# Altium footprint library MY_LIB_Connectors_CONNFLY.PcbLib: 239 footprints (part 15 of 15)
Each footprint in its own frame and in the unit in brackets; x right, y up, seen from the top. Pads: shape width x height; smd on the part's side, far side on the other; paste and mask are expansions set on the pad; w line width, h text height; cw(c..) or ccw(c..) is an arc to the next point about the centre after c.
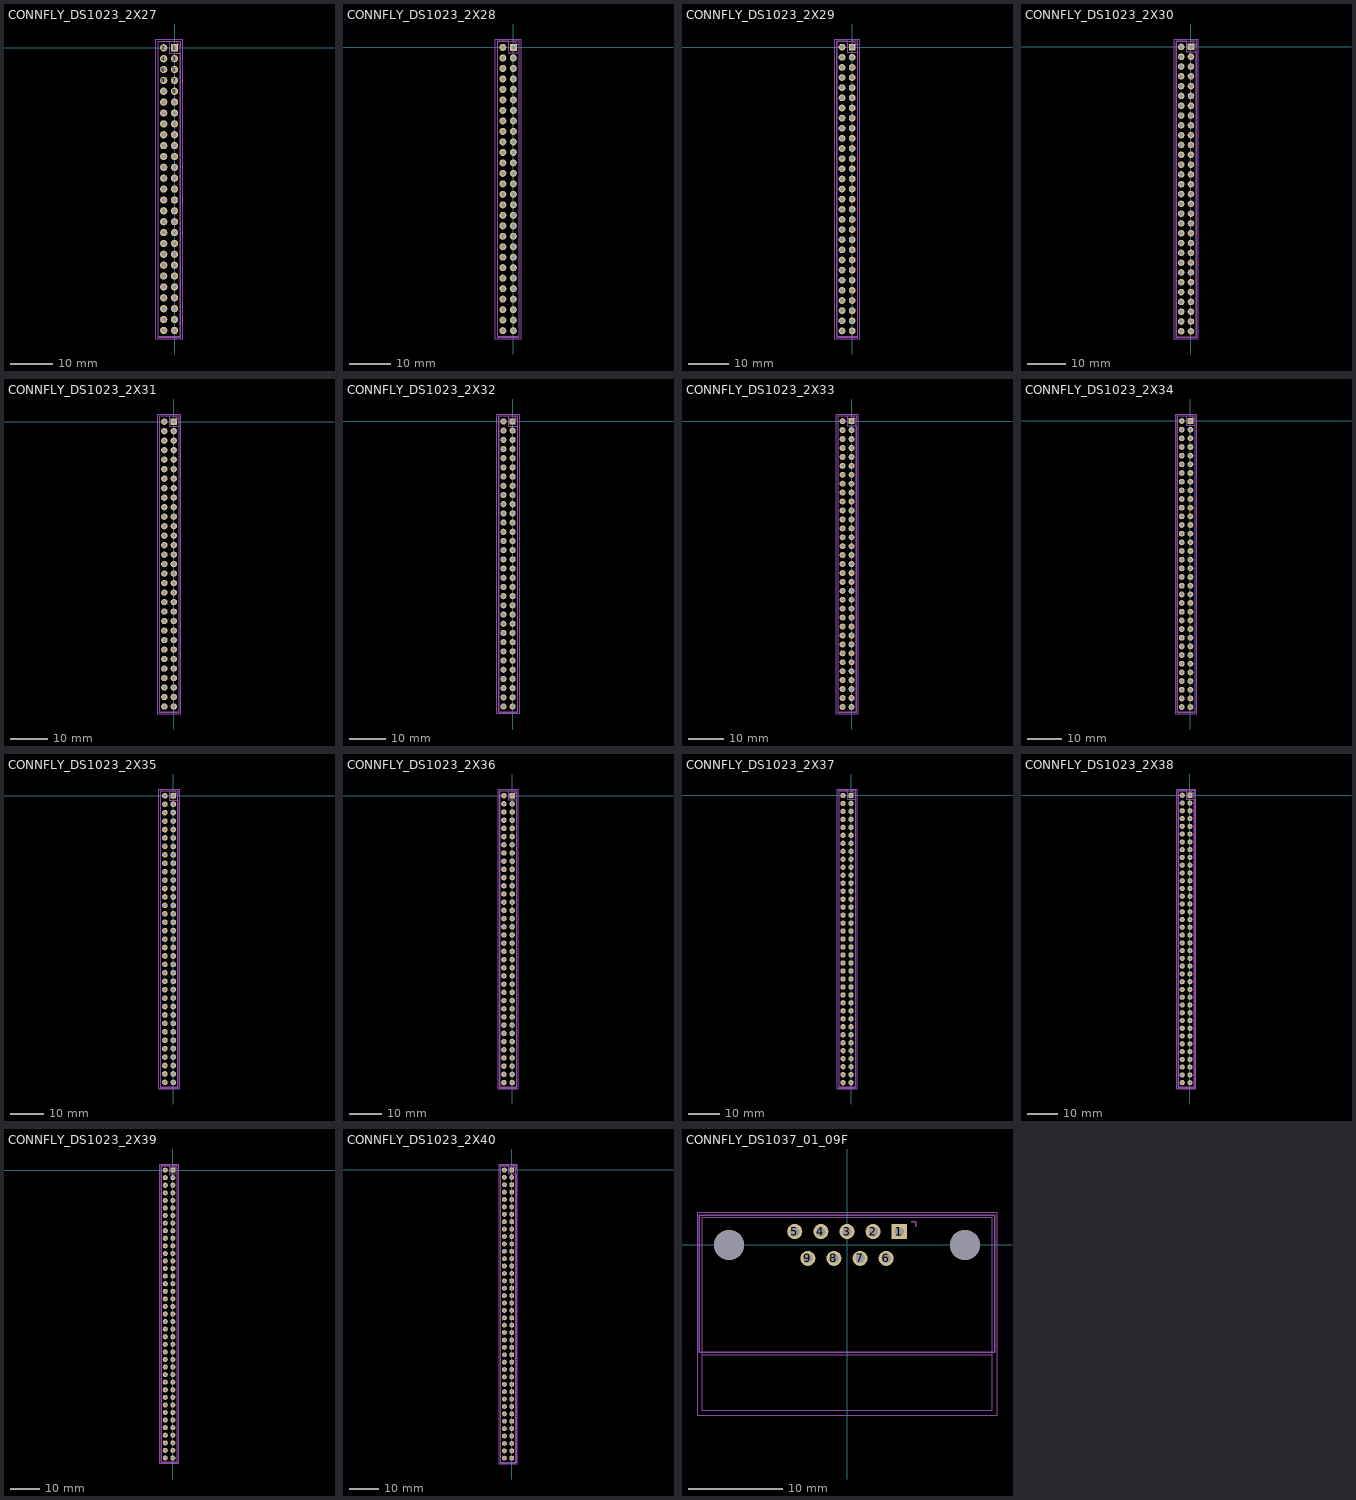
[diagram p14: the footprints below, top view; thin cyan lines are the x and y axes]

## CONNFLY_DS1023_2X27 [mm] "Connfly DS1023 2x27 standard KiCad; PTH1.0 pad1.7 pitch2.54; CC-BY-SA-4.0; STEP generic"
height 8.5
pads (54):
  rect 1.7x1.7 hole 1 paste-2539.97 mask+0.05: 1(0,0)
  round 1.7 hole 1 paste-2539.97 mask+0.05: 2(-2.54,0) 3(0,-2.54) 4(-2.54,-2.54) 5(0,-5.08) 6(-2.54,-5.08) 7(0,-7.62) 8(-2.54,-7.62) 9(0,-10.16) 10(-2.54,-10.16) 11(0,-12.7) 12(-2.54,-12.7) 13(0,-15.24) 14(-2.54,-15.24) 15(0,-17.78) 16(-2.54,-17.78) 17(0,-20.32) 18(-2.54,-20.32) 19(0,-22.86) 20(-2.54,-22.86) 21(0,-25.4) 22(-2.54,-25.4) 23(0,-27.94) 24(-2.54,-27.94) 25(0,-30.48) 26(-2.54,-30.48) 27(0,-33.02) 28(-2.54,-33.02) 29(0,-35.56) 30(-2.54,-35.56) 31(0,-38.1) 32(-2.54,-38.1) 33(0,-40.64) 34(-2.54,-40.64) 35(0,-43.18) 36(-2.54,-43.18) 37(0,-45.72) 38(-2.54,-45.72) 39(0,-48.26) 40(-2.54,-48.26) 41(0,-50.8) 42(-2.54,-50.8) 43(0,-53.34) 44(-2.54,-53.34) 45(0,-55.88) 46(-2.54,-55.88) 47(0,-58.42) 48(-2.54,-58.42) 49(0,-60.96) 50(-2.54,-60.96) 51(0,-63.5) 52(-2.54,-63.5) 53(0,-66.04) 54(-2.54,-66.04)
Mechanical 15:
  lines w0.05: -4.34,-68.05 -4.34,2.05 1.76,2.05 1.76,-68.05 -4.34,-68.05
  lines w0.1: -3.81,-67.56 -3.81,1.52 0.27,1.52 1.27,0.52 1.27,-67.56 -3.81,-67.56
  lines w0.12: 0,1.58 1.33,1.58 1.33,0 ; -3.87,-67.62 -3.87,1.58 -1.27,1.58 -1.27,-1.27 1.33,-1.27 1.33,-67.62 -3.87,-67.62
3D body "PinSocket_2x27_P2.54mm_Vertical.step": height 8.5, standoff -3.1, extent -3.81,-67.56 1.27,1.52

## CONNFLY_DS1023_2X28 [mm] "Connfly DS1023 2x28 standard KiCad; PTH1.0 pad1.7 pitch2.54; CC-BY-SA-4.0; STEP generic"
height 8.5
pads (56):
  rect 1.7x1.7 hole 1 paste-2539.97 mask+0.05: 1(0,0)
  round 1.7 hole 1 paste-2539.97 mask+0.05: 2(-2.54,0) 3(0,-2.54) 4(-2.54,-2.54) 5(0,-5.08) 6(-2.54,-5.08) 7(0,-7.62) 8(-2.54,-7.62) 9(0,-10.16) 10(-2.54,-10.16) 11(0,-12.7) 12(-2.54,-12.7) 13(0,-15.24) 14(-2.54,-15.24) 15(0,-17.78) 16(-2.54,-17.78) 17(0,-20.32) 18(-2.54,-20.32) 19(0,-22.86) 20(-2.54,-22.86) 21(0,-25.4) 22(-2.54,-25.4) 23(0,-27.94) 24(-2.54,-27.94) 25(0,-30.48) 26(-2.54,-30.48) 27(0,-33.02) 28(-2.54,-33.02) 29(0,-35.56) 30(-2.54,-35.56) 31(0,-38.1) 32(-2.54,-38.1) 33(0,-40.64) 34(-2.54,-40.64) 35(0,-43.18) 36(-2.54,-43.18) 37(0,-45.72) 38(-2.54,-45.72) 39(0,-48.26) 40(-2.54,-48.26) 41(0,-50.8) 42(-2.54,-50.8) 43(0,-53.34) 44(-2.54,-53.34) 45(0,-55.88) 46(-2.54,-55.88) 47(0,-58.42) 48(-2.54,-58.42) 49(0,-60.96) 50(-2.54,-60.96) 51(0,-63.5) 52(-2.54,-63.5) 53(0,-66.04) 54(-2.54,-66.04) 55(0,-68.58) 56(-2.54,-68.58)
Mechanical 15:
  lines w0.05: -4.34,-70.6 -4.34,2.05 1.76,2.05 1.76,-70.6 -4.34,-70.6
  lines w0.1: -3.81,-70.1 -3.81,1.52 0.27,1.52 1.27,0.52 1.27,-70.1 -3.81,-70.1
  lines w0.12: 0,1.58 1.33,1.58 1.33,0 ; -3.87,-70.16 -3.87,1.58 -1.27,1.58 -1.27,-1.27 1.33,-1.27 1.33,-70.16 -3.87,-70.16
3D body "PinSocket_2x28_P2.54mm_Vertical.step": height 8.5, standoff -3.1, extent -3.81,-70.1 1.27,1.52

## CONNFLY_DS1023_2X29 [mm] "Connfly DS1023 2x29 standard KiCad; PTH1.0 pad1.7 pitch2.54; CC-BY-SA-4.0; STEP generic"
height 8.5
pads (58):
  rect 1.7x1.7 hole 1 paste-2539.97 mask+0.05: 1(0,0)
  round 1.7 hole 1 paste-2539.97 mask+0.05: 2(-2.54,0) 3(0,-2.54) 4(-2.54,-2.54) 5(0,-5.08) 6(-2.54,-5.08) 7(0,-7.62) 8(-2.54,-7.62) 9(0,-10.16) 10(-2.54,-10.16) 11(0,-12.7) 12(-2.54,-12.7) 13(0,-15.24) 14(-2.54,-15.24) 15(0,-17.78) 16(-2.54,-17.78) 17(0,-20.32) 18(-2.54,-20.32) 19(0,-22.86) 20(-2.54,-22.86) 21(0,-25.4) 22(-2.54,-25.4) 23(0,-27.94) 24(-2.54,-27.94) 25(0,-30.48) 26(-2.54,-30.48) 27(0,-33.02) 28(-2.54,-33.02) 29(0,-35.56) 30(-2.54,-35.56) 31(0,-38.1) 32(-2.54,-38.1) 33(0,-40.64) 34(-2.54,-40.64) 35(0,-43.18) 36(-2.54,-43.18) 37(0,-45.72) 38(-2.54,-45.72) 39(0,-48.26) 40(-2.54,-48.26) 41(0,-50.8) 42(-2.54,-50.8) 43(0,-53.34) 44(-2.54,-53.34) 45(0,-55.88) 46(-2.54,-55.88) 47(0,-58.42) 48(-2.54,-58.42) 49(0,-60.96) 50(-2.54,-60.96) 51(0,-63.5) 52(-2.54,-63.5) 53(0,-66.04) 54(-2.54,-66.04) 55(0,-68.58) 56(-2.54,-68.58) 57(0,-71.12) 58(-2.54,-71.12)
Mechanical 15:
  lines w0.05: -4.34,-73.15 -4.34,2.05 1.76,2.05 1.76,-73.15 -4.34,-73.15
  lines w0.1: -3.81,-72.64 -3.81,1.52 0.27,1.52 1.27,0.52 1.27,-72.64 -3.81,-72.64
  lines w0.12: 0,1.58 1.33,1.58 1.33,0 ; -3.87,-72.7 -3.87,1.58 -1.27,1.58 -1.27,-1.27 1.33,-1.27 1.33,-72.7 -3.87,-72.7
3D body "PinSocket_2x29_P2.54mm_Vertical.step": height 8.5, standoff -3.1, extent -3.81,-72.64 1.27,1.52

## CONNFLY_DS1023_2X30 [mm] "Connfly DS1023 2x30 standard KiCad; PTH1.0 pad1.7 pitch2.54; CC-BY-SA-4.0; STEP generic"
height 8.5
pads (60):
  rect 1.7x1.7 hole 1 paste-2539.97 mask+0.05: 1(0,0)
  round 1.7 hole 1 paste-2539.97 mask+0.05: 2(-2.54,0) 3(0,-2.54) 4(-2.54,-2.54) 5(0,-5.08) 6(-2.54,-5.08) 7(0,-7.62) 8(-2.54,-7.62) 9(0,-10.16) 10(-2.54,-10.16) 11(0,-12.7) 12(-2.54,-12.7) 13(0,-15.24) 14(-2.54,-15.24) 15(0,-17.78) 16(-2.54,-17.78) 17(0,-20.32) 18(-2.54,-20.32) 19(0,-22.86) 20(-2.54,-22.86) 21(0,-25.4) 22(-2.54,-25.4) 23(0,-27.94) 24(-2.54,-27.94) 25(0,-30.48) 26(-2.54,-30.48) 27(0,-33.02) 28(-2.54,-33.02) 29(0,-35.56) 30(-2.54,-35.56) 31(0,-38.1) 32(-2.54,-38.1) 33(0,-40.64) 34(-2.54,-40.64) 35(0,-43.18) 36(-2.54,-43.18) 37(0,-45.72) 38(-2.54,-45.72) 39(0,-48.26) 40(-2.54,-48.26) 41(0,-50.8) 42(-2.54,-50.8) 43(0,-53.34) 44(-2.54,-53.34) 45(0,-55.88) 46(-2.54,-55.88) 47(0,-58.42) 48(-2.54,-58.42) 49(0,-60.96) 50(-2.54,-60.96) 51(0,-63.5) 52(-2.54,-63.5) 53(0,-66.04) 54(-2.54,-66.04) 55(0,-68.58) 56(-2.54,-68.58) 57(0,-71.12) 58(-2.54,-71.12) 59(0,-73.66) 60(-2.54,-73.66)
Mechanical 15:
  lines w0.05: -4.34,-75.65 -4.34,2.05 1.76,2.05 1.76,-75.65 -4.34,-75.65
  lines w0.1: -3.81,-75.18 -3.81,1.52 0.27,1.52 1.27,0.52 1.27,-75.18 -3.81,-75.18
  lines w0.12: 0,1.58 1.33,1.58 1.33,0 ; -3.87,-75.24 -3.87,1.58 -1.27,1.58 -1.27,-1.27 1.33,-1.27 1.33,-75.24 -3.87,-75.24
3D body "PinSocket_2x30_P2.54mm_Vertical.step": height 8.5, standoff -3.1, extent -3.81,-75.18 1.27,1.52

## CONNFLY_DS1023_2X31 [mm] "Connfly DS1023 2x31 standard KiCad; PTH1.0 pad1.7 pitch2.54; CC-BY-SA-4.0; STEP generic"
height 8.5
pads (62):
  rect 1.7x1.7 hole 1 paste-2539.97 mask+0.05: 1(0,0)
  round 1.7 hole 1 paste-2539.97 mask+0.05: 2(-2.54,0) 3(0,-2.54) 4(-2.54,-2.54) 5(0,-5.08) 6(-2.54,-5.08) 7(0,-7.62) 8(-2.54,-7.62) 9(0,-10.16) 10(-2.54,-10.16) 11(0,-12.7) 12(-2.54,-12.7) 13(0,-15.24) 14(-2.54,-15.24) 15(0,-17.78) 16(-2.54,-17.78) 17(0,-20.32) 18(-2.54,-20.32) 19(0,-22.86) 20(-2.54,-22.86) 21(0,-25.4) 22(-2.54,-25.4) 23(0,-27.94) 24(-2.54,-27.94) 25(0,-30.48) 26(-2.54,-30.48) 27(0,-33.02) 28(-2.54,-33.02) 29(0,-35.56) 30(-2.54,-35.56) 31(0,-38.1) 32(-2.54,-38.1) 33(0,-40.64) 34(-2.54,-40.64) 35(0,-43.18) 36(-2.54,-43.18) 37(0,-45.72) 38(-2.54,-45.72) 39(0,-48.26) 40(-2.54,-48.26) 41(0,-50.8) 42(-2.54,-50.8) 43(0,-53.34) 44(-2.54,-53.34) 45(0,-55.88) 46(-2.54,-55.88) 47(0,-58.42) 48(-2.54,-58.42) 49(0,-60.96) 50(-2.54,-60.96) 51(0,-63.5) 52(-2.54,-63.5) 53(0,-66.04) 54(-2.54,-66.04) 55(0,-68.58) 56(-2.54,-68.58) 57(0,-71.12) 58(-2.54,-71.12) 59(0,-73.66) 60(-2.54,-73.66) 61(0,-76.2) 62(-2.54,-76.2)
Mechanical 15:
  lines w0.05: -4.34,-78.2 -4.34,2.05 1.76,2.05 1.76,-78.2 -4.34,-78.2
  lines w0.1: -3.81,-77.72 -3.81,1.52 0.27,1.52 1.27,0.52 1.27,-77.72 -3.81,-77.72
  lines w0.12: 0,1.58 1.33,1.58 1.33,0 ; -3.87,-77.78 -3.87,1.58 -1.27,1.58 -1.27,-1.27 1.33,-1.27 1.33,-77.78 -3.87,-77.78
3D body "PinSocket_2x31_P2.54mm_Vertical.step": height 8.5, standoff -3.1, extent -3.81,-77.72 1.27,1.52

## CONNFLY_DS1023_2X32 [mm] "Connfly DS1023 2x32 standard KiCad; PTH1.0 pad1.7 pitch2.54; CC-BY-SA-4.0; STEP generic"
height 8.5
pads (64):
  rect 1.7x1.7 hole 1 paste-2539.97 mask+0.05: 1(0,0)
  round 1.7 hole 1 paste-2539.97 mask+0.05: 2(-2.54,0) 3(0,-2.54) 4(-2.54,-2.54) 5(0,-5.08) 6(-2.54,-5.08) 7(0,-7.62) 8(-2.54,-7.62) 9(0,-10.16) 10(-2.54,-10.16) 11(0,-12.7) 12(-2.54,-12.7) 13(0,-15.24) 14(-2.54,-15.24) 15(0,-17.78) 16(-2.54,-17.78) 17(0,-20.32) 18(-2.54,-20.32) 19(0,-22.86) 20(-2.54,-22.86) 21(0,-25.4) 22(-2.54,-25.4) 23(0,-27.94) 24(-2.54,-27.94) 25(0,-30.48) 26(-2.54,-30.48) 27(0,-33.02) 28(-2.54,-33.02) 29(0,-35.56) 30(-2.54,-35.56) 31(0,-38.1) 32(-2.54,-38.1) 33(0,-40.64) 34(-2.54,-40.64) 35(0,-43.18) 36(-2.54,-43.18) 37(0,-45.72) 38(-2.54,-45.72) 39(0,-48.26) 40(-2.54,-48.26) 41(0,-50.8) 42(-2.54,-50.8) 43(0,-53.34) 44(-2.54,-53.34) 45(0,-55.88) 46(-2.54,-55.88) 47(0,-58.42) 48(-2.54,-58.42) 49(0,-60.96) 50(-2.54,-60.96) 51(0,-63.5) 52(-2.54,-63.5) 53(0,-66.04) 54(-2.54,-66.04) 55(0,-68.58) 56(-2.54,-68.58) 57(0,-71.12) 58(-2.54,-71.12) 59(0,-73.66) 60(-2.54,-73.66) 61(0,-76.2) 62(-2.54,-76.2) 63(0,-78.74) 64(-2.54,-78.74)
Mechanical 15:
  lines w0.05: -4.34,-80.8 -4.34,2.05 1.76,2.05 1.76,-80.8 -4.34,-80.8
  lines w0.1: -3.81,-80.26 -3.81,1.52 0.27,1.52 1.27,0.52 1.27,-80.26 -3.81,-80.26
  lines w0.12: 0,1.58 1.33,1.58 1.33,0 ; -3.87,-80.32 -3.87,1.58 -1.27,1.58 -1.27,-1.27 1.33,-1.27 1.33,-80.32 -3.87,-80.32
3D body "PinSocket_2x32_P2.54mm_Vertical.step": height 8.5, standoff -3.1, extent -3.81,-80.26 1.27,1.52

## CONNFLY_DS1023_2X33 [mm] "Connfly DS1023 2x33 standard KiCad; PTH1.0 pad1.7 pitch2.54; CC-BY-SA-4.0; STEP generic"
height 8.5
pads (66):
  rect 1.7x1.7 hole 1 paste-2539.97 mask+0.05: 1(0,0)
  round 1.7 hole 1 paste-2539.97 mask+0.05: 2(-2.54,0) 3(0,-2.54) 4(-2.54,-2.54) 5(0,-5.08) 6(-2.54,-5.08) 7(0,-7.62) 8(-2.54,-7.62) 9(0,-10.16) 10(-2.54,-10.16) 11(0,-12.7) 12(-2.54,-12.7) 13(0,-15.24) 14(-2.54,-15.24) 15(0,-17.78) 16(-2.54,-17.78) 17(0,-20.32) 18(-2.54,-20.32) 19(0,-22.86) 20(-2.54,-22.86) 21(0,-25.4) 22(-2.54,-25.4) 23(0,-27.94) 24(-2.54,-27.94) 25(0,-30.48) 26(-2.54,-30.48) 27(0,-33.02) 28(-2.54,-33.02) 29(0,-35.56) 30(-2.54,-35.56) 31(0,-38.1) 32(-2.54,-38.1) 33(0,-40.64) 34(-2.54,-40.64) 35(0,-43.18) 36(-2.54,-43.18) 37(0,-45.72) 38(-2.54,-45.72) 39(0,-48.26) 40(-2.54,-48.26) 41(0,-50.8) 42(-2.54,-50.8) 43(0,-53.34) 44(-2.54,-53.34) 45(0,-55.88) 46(-2.54,-55.88) 47(0,-58.42) 48(-2.54,-58.42) 49(0,-60.96) 50(-2.54,-60.96) 51(0,-63.5) 52(-2.54,-63.5) 53(0,-66.04) 54(-2.54,-66.04) 55(0,-68.58) 56(-2.54,-68.58) 57(0,-71.12) 58(-2.54,-71.12) 59(0,-73.66) 60(-2.54,-73.66) 61(0,-76.2) 62(-2.54,-76.2) 63(0,-78.74) 64(-2.54,-78.74) 65(0,-81.28) 66(-2.54,-81.28)
Mechanical 15:
  lines w0.05: -4.34,-83.3 -4.34,2.05 1.76,2.05 1.76,-83.3 -4.34,-83.3
  lines w0.1: -3.81,-82.8 -3.81,1.52 0.27,1.52 1.27,0.52 1.27,-82.8 -3.81,-82.8
  lines w0.12: 0,1.58 1.33,1.58 1.33,0 ; -3.87,-82.86 -3.87,1.58 -1.27,1.58 -1.27,-1.27 1.33,-1.27 1.33,-82.86 -3.87,-82.86
3D body "PinSocket_2x33_P2.54mm_Vertical.step": height 8.5, standoff -3.1, extent -3.81,-82.8 1.27,1.52

## CONNFLY_DS1023_2X34 [mm] "Connfly DS1023 2x34 standard KiCad; PTH1.0 pad1.7 pitch2.54; CC-BY-SA-4.0; STEP generic"
height 8.5
pads (68):
  rect 1.7x1.7 hole 1 paste-2539.97 mask+0.05: 1(0,0)
  round 1.7 hole 1 paste-2539.97 mask+0.05: 2(-2.54,0) 3(0,-2.54) 4(-2.54,-2.54) 5(0,-5.08) 6(-2.54,-5.08) 7(0,-7.62) 8(-2.54,-7.62) 9(0,-10.16) 10(-2.54,-10.16) 11(0,-12.7) 12(-2.54,-12.7) 13(0,-15.24) 14(-2.54,-15.24) 15(0,-17.78) 16(-2.54,-17.78) 17(0,-20.32) 18(-2.54,-20.32) 19(0,-22.86) 20(-2.54,-22.86) 21(0,-25.4) 22(-2.54,-25.4) 23(0,-27.94) 24(-2.54,-27.94) 25(0,-30.48) 26(-2.54,-30.48) 27(0,-33.02) 28(-2.54,-33.02) 29(0,-35.56) 30(-2.54,-35.56) 31(0,-38.1) 32(-2.54,-38.1) 33(0,-40.64) 34(-2.54,-40.64) 35(0,-43.18) 36(-2.54,-43.18) 37(0,-45.72) 38(-2.54,-45.72) 39(0,-48.26) 40(-2.54,-48.26) 41(0,-50.8) 42(-2.54,-50.8) 43(0,-53.34) 44(-2.54,-53.34) 45(0,-55.88) 46(-2.54,-55.88) 47(0,-58.42) 48(-2.54,-58.42) 49(0,-60.96) 50(-2.54,-60.96) 51(0,-63.5) 52(-2.54,-63.5) 53(0,-66.04) 54(-2.54,-66.04) 55(0,-68.58) 56(-2.54,-68.58) 57(0,-71.12) 58(-2.54,-71.12) 59(0,-73.66) 60(-2.54,-73.66) 61(0,-76.2) 62(-2.54,-76.2) 63(0,-78.74) 64(-2.54,-78.74) 65(0,-81.28) 66(-2.54,-81.28) 67(0,-83.82) 68(-2.54,-83.82)
Mechanical 15:
  lines w0.05: -4.34,-85.85 -4.34,2.05 1.76,2.05 1.76,-85.85 -4.34,-85.85
  lines w0.1: -3.81,-85.34 -3.81,1.52 0.27,1.52 1.27,0.52 1.27,-85.34 -3.81,-85.34
  lines w0.12: 0,1.58 1.33,1.58 1.33,0 ; -3.87,-85.4 -3.87,1.58 -1.27,1.58 -1.27,-1.27 1.33,-1.27 1.33,-85.4 -3.87,-85.4
3D body "PinSocket_2x34_P2.54mm_Vertical.step": height 8.5, standoff -3.1, extent -3.81,-85.34 1.27,1.52

## CONNFLY_DS1023_2X35 [mm] "Connfly DS1023 2x35 standard KiCad; PTH1.0 pad1.7 pitch2.54; CC-BY-SA-4.0; STEP generic"
height 8.5
pads (70):
  rect 1.7x1.7 hole 1 paste-2539.97 mask+0.05: 1(0,0)
  round 1.7 hole 1 paste-2539.97 mask+0.05: 2(-2.54,0) 3(0,-2.54) 4(-2.54,-2.54) 5(0,-5.08) 6(-2.54,-5.08) 7(0,-7.62) 8(-2.54,-7.62) 9(0,-10.16) 10(-2.54,-10.16) 11(0,-12.7) 12(-2.54,-12.7) 13(0,-15.24) 14(-2.54,-15.24) 15(0,-17.78) 16(-2.54,-17.78) 17(0,-20.32) 18(-2.54,-20.32) 19(0,-22.86) 20(-2.54,-22.86) 21(0,-25.4) 22(-2.54,-25.4) 23(0,-27.94) 24(-2.54,-27.94) 25(0,-30.48) 26(-2.54,-30.48) 27(0,-33.02) 28(-2.54,-33.02) 29(0,-35.56) 30(-2.54,-35.56) 31(0,-38.1) 32(-2.54,-38.1) 33(0,-40.64) 34(-2.54,-40.64) 35(0,-43.18) 36(-2.54,-43.18) 37(0,-45.72) 38(-2.54,-45.72) 39(0,-48.26) 40(-2.54,-48.26) 41(0,-50.8) 42(-2.54,-50.8) 43(0,-53.34) 44(-2.54,-53.34) 45(0,-55.88) 46(-2.54,-55.88) 47(0,-58.42) 48(-2.54,-58.42) 49(0,-60.96) 50(-2.54,-60.96) 51(0,-63.5) 52(-2.54,-63.5) 53(0,-66.04) 54(-2.54,-66.04) 55(0,-68.58) 56(-2.54,-68.58) 57(0,-71.12) 58(-2.54,-71.12) 59(0,-73.66) 60(-2.54,-73.66) 61(0,-76.2) 62(-2.54,-76.2) 63(0,-78.74) 64(-2.54,-78.74) 65(0,-81.28) 66(-2.54,-81.28) 67(0,-83.82) 68(-2.54,-83.82) 69(0,-86.36) 70(-2.54,-86.36)
Mechanical 15:
  lines w0.05: -4.34,-88.35 -4.34,2.05 1.76,2.05 1.76,-88.35 -4.34,-88.35
  lines w0.1: -3.81,-87.88 -3.81,1.52 0.27,1.52 1.27,0.52 1.27,-87.88 -3.81,-87.88
  lines w0.12: 0,1.58 1.33,1.58 1.33,0 ; -3.87,-87.94 -3.87,1.58 -1.27,1.58 -1.27,-1.27 1.33,-1.27 1.33,-87.94 -3.87,-87.94
3D body "PinSocket_2x35_P2.54mm_Vertical.step": height 8.5, standoff -3.1, extent -3.81,-87.88 1.27,1.52

## CONNFLY_DS1023_2X36 [mm] "Connfly DS1023 2x36 standard KiCad; PTH1.0 pad1.7 pitch2.54; CC-BY-SA-4.0; STEP generic"
height 8.5
pads (72):
  rect 1.7x1.7 hole 1 paste-2539.97 mask+0.05: 1(0,0)
  round 1.7 hole 1 paste-2539.97 mask+0.05: 2(-2.54,0) 3(0,-2.54) 4(-2.54,-2.54) 5(0,-5.08) 6(-2.54,-5.08) 7(0,-7.62) 8(-2.54,-7.62) 9(0,-10.16) 10(-2.54,-10.16) 11(0,-12.7) 12(-2.54,-12.7) 13(0,-15.24) 14(-2.54,-15.24) 15(0,-17.78) 16(-2.54,-17.78) 17(0,-20.32) 18(-2.54,-20.32) 19(0,-22.86) 20(-2.54,-22.86) 21(0,-25.4) 22(-2.54,-25.4) 23(0,-27.94) 24(-2.54,-27.94) 25(0,-30.48) 26(-2.54,-30.48) 27(0,-33.02) 28(-2.54,-33.02) 29(0,-35.56) 30(-2.54,-35.56) 31(0,-38.1) 32(-2.54,-38.1) 33(0,-40.64) 34(-2.54,-40.64) 35(0,-43.18) 36(-2.54,-43.18) 37(0,-45.72) 38(-2.54,-45.72) 39(0,-48.26) 40(-2.54,-48.26) 41(0,-50.8) 42(-2.54,-50.8) 43(0,-53.34) 44(-2.54,-53.34) 45(0,-55.88) 46(-2.54,-55.88) 47(0,-58.42) 48(-2.54,-58.42) 49(0,-60.96) 50(-2.54,-60.96) 51(0,-63.5) 52(-2.54,-63.5) 53(0,-66.04) 54(-2.54,-66.04) 55(0,-68.58) 56(-2.54,-68.58) 57(0,-71.12) 58(-2.54,-71.12) 59(0,-73.66) 60(-2.54,-73.66) 61(0,-76.2) 62(-2.54,-76.2) 63(0,-78.74) 64(-2.54,-78.74) 65(0,-81.28) 66(-2.54,-81.28) 67(0,-83.82) 68(-2.54,-83.82) 69(0,-86.36) 70(-2.54,-86.36) 71(0,-88.9) 72(-2.54,-88.9)
Mechanical 15:
  lines w0.05: -4.34,-90.9 -4.34,2.05 1.76,2.05 1.76,-90.9 -4.34,-90.9
  lines w0.1: -3.81,-90.42 -3.81,1.52 0.27,1.52 1.27,0.52 1.27,-90.42 -3.81,-90.42
  lines w0.12: 0,1.58 1.33,1.58 1.33,0 ; -3.87,-90.48 -3.87,1.58 -1.27,1.58 -1.27,-1.27 1.33,-1.27 1.33,-90.48 -3.87,-90.48
3D body "PinSocket_2x36_P2.54mm_Vertical.step": height 8.5, standoff -3.1, extent -3.81,-90.42 1.27,1.52

## CONNFLY_DS1023_2X37 [mm] "Connfly DS1023 2x37 standard KiCad; PTH1.0 pad1.7 pitch2.54; CC-BY-SA-4.0; STEP generic"
height 8.5
pads (74):
  rect 1.7x1.7 hole 1 paste-2539.97 mask+0.05: 1(0,0)
  round 1.7 hole 1 paste-2539.97 mask+0.05: 2(-2.54,0) 3(0,-2.54) 4(-2.54,-2.54) 5(0,-5.08) 6(-2.54,-5.08) 7(0,-7.62) 8(-2.54,-7.62) 9(0,-10.16) 10(-2.54,-10.16) 11(0,-12.7) 12(-2.54,-12.7) 13(0,-15.24) 14(-2.54,-15.24) 15(0,-17.78) 16(-2.54,-17.78) 17(0,-20.32) 18(-2.54,-20.32) 19(0,-22.86) 20(-2.54,-22.86) 21(0,-25.4) 22(-2.54,-25.4) 23(0,-27.94) 24(-2.54,-27.94) 25(0,-30.48) 26(-2.54,-30.48) 27(0,-33.02) 28(-2.54,-33.02) 29(0,-35.56) 30(-2.54,-35.56) 31(0,-38.1) 32(-2.54,-38.1) 33(0,-40.64) 34(-2.54,-40.64) 35(0,-43.18) 36(-2.54,-43.18) 37(0,-45.72) 38(-2.54,-45.72) 39(0,-48.26) 40(-2.54,-48.26) 41(0,-50.8) 42(-2.54,-50.8) 43(0,-53.34) 44(-2.54,-53.34) 45(0,-55.88) 46(-2.54,-55.88) 47(0,-58.42) 48(-2.54,-58.42) 49(0,-60.96) 50(-2.54,-60.96) 51(0,-63.5) 52(-2.54,-63.5) 53(0,-66.04) 54(-2.54,-66.04) 55(0,-68.58) 56(-2.54,-68.58) 57(0,-71.12) 58(-2.54,-71.12) 59(0,-73.66) 60(-2.54,-73.66) 61(0,-76.2) 62(-2.54,-76.2) 63(0,-78.74) 64(-2.54,-78.74) 65(0,-81.28) 66(-2.54,-81.28) 67(0,-83.82) 68(-2.54,-83.82) 69(0,-86.36) 70(-2.54,-86.36) 71(0,-88.9) 72(-2.54,-88.9) 73(0,-91.44) 74(-2.54,-91.44)
Mechanical 15:
  lines w0.05: -4.34,-93.45 -4.34,2.05 1.76,2.05 1.76,-93.45 -4.34,-93.45
  lines w0.1: -3.81,-92.96 -3.81,1.52 0.27,1.52 1.27,0.52 1.27,-92.96 -3.81,-92.96
  lines w0.12: 0,1.58 1.33,1.58 1.33,0 ; -3.87,-93.02 -3.87,1.58 -1.27,1.58 -1.27,-1.27 1.33,-1.27 1.33,-93.02 -3.87,-93.02
3D body "PinSocket_2x37_P2.54mm_Vertical.step": height 8.5, standoff -3.1, extent -3.81,-92.96 1.27,1.52

## CONNFLY_DS1023_2X38 [mm] "Connfly DS1023 2x38 standard KiCad; PTH1.0 pad1.7 pitch2.54; CC-BY-SA-4.0; STEP generic"
height 8.5
pads (76):
  rect 1.7x1.7 hole 1 paste-2539.97 mask+0.05: 1(0,0)
  round 1.7 hole 1 paste-2539.97 mask+0.05: 2(-2.54,0) 3(0,-2.54) 4(-2.54,-2.54) 5(0,-5.08) 6(-2.54,-5.08) 7(0,-7.62) 8(-2.54,-7.62) 9(0,-10.16) 10(-2.54,-10.16) 11(0,-12.7) 12(-2.54,-12.7) 13(0,-15.24) 14(-2.54,-15.24) 15(0,-17.78) 16(-2.54,-17.78) 17(0,-20.32) 18(-2.54,-20.32) 19(0,-22.86) 20(-2.54,-22.86) 21(0,-25.4) 22(-2.54,-25.4) 23(0,-27.94) 24(-2.54,-27.94) 25(0,-30.48) 26(-2.54,-30.48) 27(0,-33.02) 28(-2.54,-33.02) 29(0,-35.56) 30(-2.54,-35.56) 31(0,-38.1) 32(-2.54,-38.1) 33(0,-40.64) 34(-2.54,-40.64) 35(0,-43.18) 36(-2.54,-43.18) 37(0,-45.72) 38(-2.54,-45.72) 39(0,-48.26) 40(-2.54,-48.26) 41(0,-50.8) 42(-2.54,-50.8) 43(0,-53.34) 44(-2.54,-53.34) 45(0,-55.88) 46(-2.54,-55.88) 47(0,-58.42) 48(-2.54,-58.42) 49(0,-60.96) 50(-2.54,-60.96) 51(0,-63.5) 52(-2.54,-63.5) 53(0,-66.04) 54(-2.54,-66.04) 55(0,-68.58) 56(-2.54,-68.58) 57(0,-71.12) 58(-2.54,-71.12) 59(0,-73.66) 60(-2.54,-73.66) 61(0,-76.2) 62(-2.54,-76.2) 63(0,-78.74) 64(-2.54,-78.74) 65(0,-81.28) 66(-2.54,-81.28) 67(0,-83.82) 68(-2.54,-83.82) 69(0,-86.36) 70(-2.54,-86.36) 71(0,-88.9) 72(-2.54,-88.9) 73(0,-91.44) 74(-2.54,-91.44) 75(0,-93.98) 76(-2.54,-93.98)
Mechanical 15:
  lines w0.05: -4.34,-96.05 -4.34,2.05 1.76,2.05 1.76,-96.05 -4.34,-96.05
  lines w0.1: -3.81,-95.5 -3.81,1.52 0.27,1.52 1.27,0.52 1.27,-95.5 -3.81,-95.5
  lines w0.12: 0,1.58 1.33,1.58 1.33,0 ; -3.87,-95.56 -3.87,1.58 -1.27,1.58 -1.27,-1.27 1.33,-1.27 1.33,-95.56 -3.87,-95.56
3D body "PinSocket_2x38_P2.54mm_Vertical.step": height 8.5, standoff -3.1, extent -3.81,-95.5 1.27,1.52

## CONNFLY_DS1023_2X39 [mm] "Connfly DS1023 2x39 standard KiCad; PTH1.0 pad1.7 pitch2.54; CC-BY-SA-4.0; STEP generic"
height 8.5
pads (78):
  rect 1.7x1.7 hole 1 paste-2539.97 mask+0.05: 1(0,0)
  round 1.7 hole 1 paste-2539.97 mask+0.05: 2(-2.54,0) 3(0,-2.54) 4(-2.54,-2.54) 5(0,-5.08) 6(-2.54,-5.08) 7(0,-7.62) 8(-2.54,-7.62) 9(0,-10.16) 10(-2.54,-10.16) 11(0,-12.7) 12(-2.54,-12.7) 13(0,-15.24) 14(-2.54,-15.24) 15(0,-17.78) 16(-2.54,-17.78) 17(0,-20.32) 18(-2.54,-20.32) 19(0,-22.86) 20(-2.54,-22.86) 21(0,-25.4) 22(-2.54,-25.4) 23(0,-27.94) 24(-2.54,-27.94) 25(0,-30.48) 26(-2.54,-30.48) 27(0,-33.02) 28(-2.54,-33.02) 29(0,-35.56) 30(-2.54,-35.56) 31(0,-38.1) 32(-2.54,-38.1) 33(0,-40.64) 34(-2.54,-40.64) 35(0,-43.18) 36(-2.54,-43.18) 37(0,-45.72) 38(-2.54,-45.72) 39(0,-48.26) 40(-2.54,-48.26) 41(0,-50.8) 42(-2.54,-50.8) 43(0,-53.34) 44(-2.54,-53.34) 45(0,-55.88) 46(-2.54,-55.88) 47(0,-58.42) 48(-2.54,-58.42) 49(0,-60.96) 50(-2.54,-60.96) 51(0,-63.5) 52(-2.54,-63.5) 53(0,-66.04) 54(-2.54,-66.04) 55(0,-68.58) 56(-2.54,-68.58) 57(0,-71.12) 58(-2.54,-71.12) 59(0,-73.66) 60(-2.54,-73.66) 61(0,-76.2) 62(-2.54,-76.2) 63(0,-78.74) 64(-2.54,-78.74) 65(0,-81.28) 66(-2.54,-81.28) 67(0,-83.82) 68(-2.54,-83.82) 69(0,-86.36) 70(-2.54,-86.36) 71(0,-88.9) 72(-2.54,-88.9) 73(0,-91.44) 74(-2.54,-91.44) 75(0,-93.98) 76(-2.54,-93.98) 77(0,-96.52) 78(-2.54,-96.52)
Mechanical 15:
  lines w0.05: -4.34,-98.55 -4.34,2.05 1.76,2.05 1.76,-98.55 -4.34,-98.55
  lines w0.1: -3.81,-98.04 -3.81,1.52 0.27,1.52 1.27,0.52 1.27,-98.04 -3.81,-98.04
  lines w0.12: 0,1.58 1.33,1.58 1.33,0 ; -3.87,-98.1 -3.87,1.58 -1.27,1.58 -1.27,-1.27 1.33,-1.27 1.33,-98.1 -3.87,-98.1
3D body "PinSocket_2x39_P2.54mm_Vertical.step": height 8.5, standoff -3.1, extent -3.81,-98.04 1.27,1.52

## CONNFLY_DS1023_2X40 [mm] "Connfly DS1023 2x40 standard KiCad; PTH1.0 pad1.7 pitch2.54; CC-BY-SA-4.0; STEP generic"
height 8.5
pads (80):
  rect 1.7x1.7 hole 1 paste-2539.97 mask+0.05: 1(0,0)
  round 1.7 hole 1 paste-2539.97 mask+0.05: 2(-2.54,0) 3(0,-2.54) 4(-2.54,-2.54) 5(0,-5.08) 6(-2.54,-5.08) 7(0,-7.62) 8(-2.54,-7.62) 9(0,-10.16) 10(-2.54,-10.16) 11(0,-12.7) 12(-2.54,-12.7) 13(0,-15.24) 14(-2.54,-15.24) 15(0,-17.78) 16(-2.54,-17.78) 17(0,-20.32) 18(-2.54,-20.32) 19(0,-22.86) 20(-2.54,-22.86) 21(0,-25.4) 22(-2.54,-25.4) 23(0,-27.94) 24(-2.54,-27.94) 25(0,-30.48) 26(-2.54,-30.48) 27(0,-33.02) 28(-2.54,-33.02) 29(0,-35.56) 30(-2.54,-35.56) 31(0,-38.1) 32(-2.54,-38.1) 33(0,-40.64) 34(-2.54,-40.64) 35(0,-43.18) 36(-2.54,-43.18) 37(0,-45.72) 38(-2.54,-45.72) 39(0,-48.26) 40(-2.54,-48.26) 41(0,-50.8) 42(-2.54,-50.8) 43(0,-53.34) 44(-2.54,-53.34) 45(0,-55.88) 46(-2.54,-55.88) 47(0,-58.42) 48(-2.54,-58.42) 49(0,-60.96) 50(-2.54,-60.96) 51(0,-63.5) 52(-2.54,-63.5) 53(0,-66.04) 54(-2.54,-66.04) 55(0,-68.58) 56(-2.54,-68.58) 57(0,-71.12) 58(-2.54,-71.12) 59(0,-73.66) 60(-2.54,-73.66) 61(0,-76.2) 62(-2.54,-76.2) 63(0,-78.74) 64(-2.54,-78.74) 65(0,-81.28) 66(-2.54,-81.28) 67(0,-83.82) 68(-2.54,-83.82) 69(0,-86.36) 70(-2.54,-86.36) 71(0,-88.9) 72(-2.54,-88.9) 73(0,-91.44) 74(-2.54,-91.44) 75(0,-93.98) 76(-2.54,-93.98) 77(0,-96.52) 78(-2.54,-96.52) 79(0,-99.06) 80(-2.54,-99.06)
Mechanical 15:
  lines w0.05: -4.34,-101.05 -4.34,2.05 1.76,2.05 1.76,-101.05 -4.34,-101.05
  lines w0.1: -3.81,-100.58 -3.81,1.52 0.27,1.52 1.27,0.52 1.27,-100.58 -3.81,-100.58
  lines w0.12: 0,1.58 1.33,1.58 1.33,0 ; -3.87,-100.64 -3.87,1.58 -1.27,1.58 -1.27,-1.27 1.33,-1.27 1.33,-100.64 -3.87,-100.64
3D body "PinSocket_2x40_P2.54mm_Vertical.step": height 8.5, standoff -3.1, extent -3.81,-100.58 1.27,1.52

## CONNFLY_DS1037_01_09F [mm] "CONNFLY DS1037-01-09F female right angle 9.4mm; PTH1.0 pads1.6 pitch2.77x2.84; NPTH3.2 spacing24.99; user STEP"
height 12.5
pads (11):
  rect 1.6x1.6 hole 1 paste-2539.97 mask+0.05: 1(5.54,1.42)
  round 1.6 hole 1 paste-2539.97 mask+0.05: 2(2.77,1.42) 3(0,1.42) 4(-2.77,1.42) 5(-5.54,1.42) 6(4.155,-1.42) 7(1.385,-1.42) 8(-1.385,-1.42) 9(-4.155,-1.42)
  round 3.2 hole 3.2 unplated paste-2539.97 mask+0.05: ""(-12.495,0) ""(12.495,0)
Mechanical 15:
  lines w0.05: -15.9,-18.04 15.9,-18.04 15.9,3.4 -15.9,3.4 -15.9,-18.04
  lines w0.1: -15.4,-11.64 15.4,-11.64 ; -15.4,-17.54 15.4,-17.54 15.4,2.9 -15.4,2.9 -15.4,-17.54
  lines w0.15: 6.8,2.45 7.3,2.45 7.3,1.95 ; -15.65,-11.39 15.65,-11.39 15.65,3.15 -15.65,3.15 -15.65,-11.39
3D body "DS1037-01-09FNAKT74.stp": height 12.5, standoff 0, extent -15.4,-17.49 15.4,2.76